# Altium footprint library Seeed_Studio_XIAO_Series_Footprints.PcbLib: 34 footprints (part 2 of 3)
Each footprint in its own frame and in the unit in brackets; x right, y up, seen from the top. Pads: shape width x height; smd on the part's side, far side on the other; paste and mask are expansions set on the pad; w line width, h text height; cw(c..) or ccw(c..) is an arc to the next point about the centre after c.
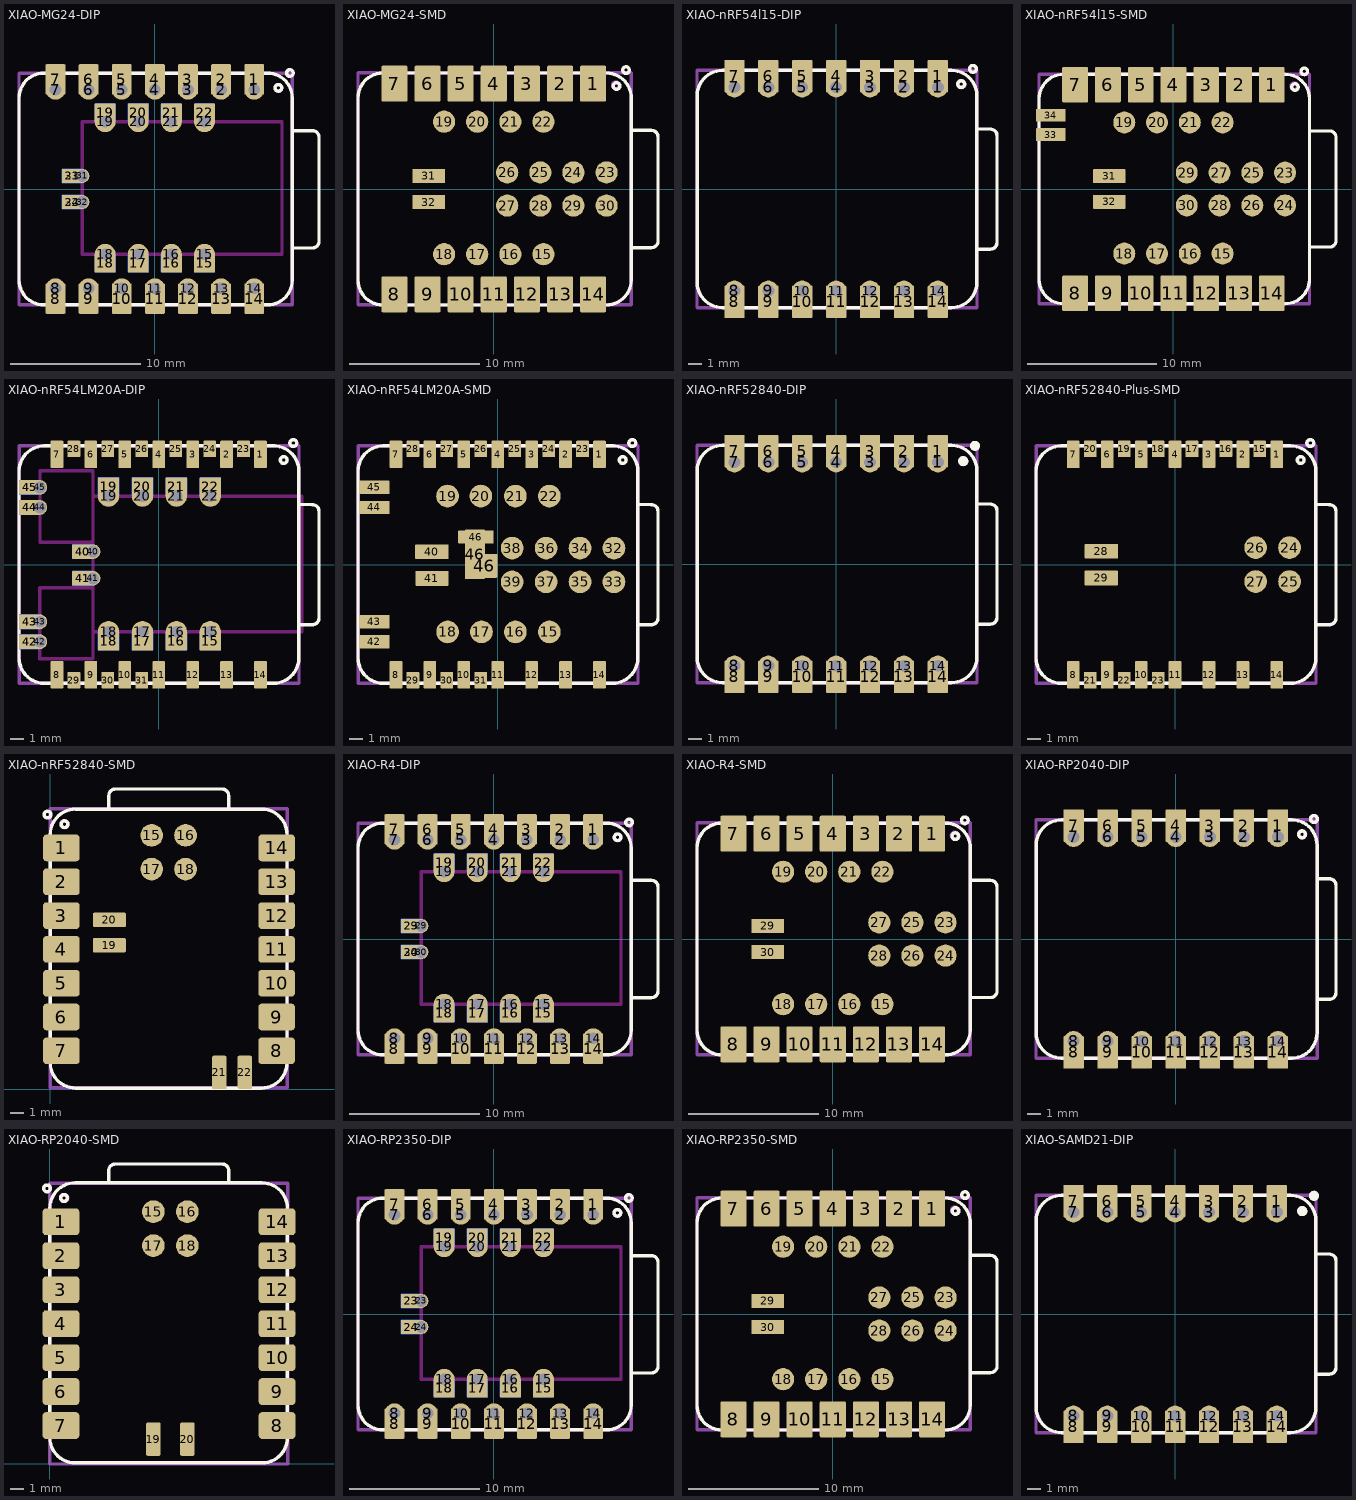
[diagram p1: the footprints below, top view; thin cyan lines are the x and y axes]

## XIAO-MG24-DIP [mm]
pads (58):
  round 1.524 hole 0.889: 1(7.62,7.62) 2(5.08,7.62) 3(2.54,7.62) 4(0,7.62) 5(-2.54,7.62) 6(-5.08,7.62) 7(-7.62,7.62) 8(-7.62,-7.62) 9(-5.08,-7.62) 10(-2.54,-7.62) 11(0,-7.62) 12(2.54,-7.62) 13(5.08,-7.62) 14(7.62,-7.62)
  rrect10% 1.524x2.332 smd: 1(7.62,8.405) 2(5.08,8.405) 3(2.54,8.405) 4(0,8.405) 5(-2.54,8.405) 6(-5.08,8.405) 7(-7.62,8.405) 8(-7.62,-8.405) 9(-5.08,-8.405) 10(-2.54,-8.405) 11(0,-8.405) 12(2.54,-8.405) 13(5.08,-8.405) 14(7.62,-8.405)
  rrect10% 1.6x1.4 smd: 15(3.81,-5.7) 16(1.27,-5.7) 17(-1.27,-5.7) 18(-3.81,-5.7) 19(-3.81,5.859) 20(-1.27,5.859) 21(1.27,5.859) 22(3.81,5.859)
  rrect10% 1.6x1.4 smd far side: 15(3.81,-5.7) 16(1.27,-5.7) 17(-1.27,-5.7) 18(-3.81,-5.7) 19(-3.81,5.859) 20(-1.27,5.859) 21(1.27,5.859) 22(3.81,5.859)
  round 1.6 hole 0.889: 15(3.81,-5.001) 16(1.27,-5.001) 17(-1.27,-5.001) 18(-3.81,-5.001) 19(-3.81,5.159) 20(-1.27,5.159) 21(1.27,5.159) 22(3.81,5.159)
  rrect10% 1.6x1.1 smd far side: 23(-6.33,1) 24(-6.33,-1)
  rrect10% 1.6x1.1 smd: 31(-6.33,1) 32(-6.33,-1)
  round 1.1 hole 0.889: 31(-5.575,1) 32(-5.575,-1)
F.SilkS:
  circle w0.254: c9.474,7.757 r0.254
  circle w0.254: c10.354,8.9 r0.254
  lines w0.254: 10.538,-7.008 10.538,6.962 ; 10.547,-4.522 12.091,-4.521 ccw(c12.091,-4.021) 12.591,-4.021 12.591,3.974 ccw(c12.091,3.974) 12.091,4.474 10.55,4.475 ; -10.414,-6.985 -10.414,6.985 cw(c-8.509,6.985) -8.509,8.89 8.636,8.89 cw(c8.636,6.985) 10.541,6.985 10.541,-6.985 cw(c8.636,-6.985) 8.636,-8.89 -8.509,-8.89 cw(c-8.509,-6.985) -10.414,-6.985
B.SilkS:
  lines w0.254: -8.128,-1.016 -7.366,-1.016 ; -8.128,1.016 -7.366,1.016 ; -7.747,0.635 -7.747,1.397
Edge.Cuts:
  lines w0.254: -5.575,-5.001 9.75,-5.001 ; -5.575,-5 -5.575,5.159 9.75,5.159 9.75,-5
F.CrtYd:
  lines w0.254: -10.42,-8.87 -10.42,8.88 10.54,8.88 10.54,-8.87 -10.42,-8.87
F.Fab:
  circle w0.254: c9.48,7.754 r0.254
  lines w0.254: -10.42,-8.89 -10.42,8.88 10.54,8.88 10.54,-8.89 -10.42,-8.89

## XIAO-MG24-SMD [mm]
pads (32):
  rrect10% 2x2.75 smd: 1(7.62,8.083) 2(5.08,8.083) 3(2.54,8.083) 4(0,8.083) 5(-2.54,8.083) 6(-5.08,8.083) 7(-7.62,8.083) 8(-7.62,-8.083) 9(-5.08,-8.083) 10(-2.54,-8.083) 11(0,-8.083) 12(2.54,-8.083) 13(5.08,-8.083) 14(7.62,-8.083)
  round 1.7 smd: 15(3.81,-5.001) 16(1.27,-5.001) 17(-1.27,-5.001) 18(-3.81,-5.001) 19(-3.81,5.159) 20(-1.27,5.159) 21(1.27,5.159) 22(3.81,5.159) 23(8.65,1.27) 24(6.11,1.27) 25(3.57,1.27) 26(1.03,1.27) 27(1.03,-1.27) 28(3.57,-1.27) 29(6.11,-1.27) 30(8.65,-1.27)
  rrect10% 2.5x1.1 smd: 31(-4.975,1) 32(-4.975,-1)
F.SilkS:
  circle w0.254: c9.414,7.899 r0.254
  circle w0.254: c10.137,9.116 r0.254
  lines w0.254: 8.636,8.89 -8.509,8.89 ccw(c-8.509,6.985) -10.414,6.985 -10.414,-6.985 ccw(c-8.509,-6.985) -8.509,-8.89 8.636,-8.89 ccw(c8.636,-6.985) 10.541,-6.985 10.541,6.985 ; 8.64,8.89 cw(c8.64,6.985) 10.545,6.985 ; 10.55,-4.499 12.094,-4.498 ccw(c12.094,-3.998) 12.594,-3.998 12.594,3.997 ccw(c12.094,3.997) 12.094,4.497 10.553,4.498
F.CrtYd:
  lines w0.254: -10.41,-8.87 -10.41,8.91 10.54,8.91 10.54,-8.87 -10.41,-8.87
F.Fab:
  circle w0.254: c9.357,7.961 r0.254
  lines w0.254: -10.41,-8.89 -10.41,8.9 10.54,8.9 10.54,-8.89 -10.41,-8.89

## XIAO-nRF54l15-DIP [mil]
pads (28):
  round 60 hole 35: 1(300,300) 2(200,300) 3(100,300) 4(0,300) 5(-100,300) 6(-200,300) 7(-300,300) 8(-300,-300) 9(-200,-300) 10(-100,-300) 11(0,-300) 12(100,-300) 13(200,-300) 14(300,-300)
  rrect10% 60x95.75 smd: 1(300,332.87) 2(200,332.87) 3(100,332.87) 4(0,332.87) 5(-100,332.87) 6(-200,332.87) 7(-300,332.87) 8(-300,-332.87) 9(-200,-332.87) 10(-100,-332.87) 11(0,-332.87) 12(100,-332.87) 13(200,-332.87) 14(300,-332.87)
F.SilkS:
  circle w10: c368.9,309.33 r10
  circle w10: c403.54,354.33 r10
  lines w10: 415,-177.32 454.76,-177.32 ccw(c454.76,-157.64) 474.45,-157.64 474.45,157.14 ccw(c454.76,157.14) 454.77,176.82 415,176.97 ; 415,-275 415,275 ; 415,-275 415,275 ; 415,-275 cw(c340,-275) 340,-350 -335,-350 cw(c-335,-275) -410,-275 -410,275 cw(c-335,275) -335,350 340,350 cw(c340,275) 415,275
F.CrtYd:
  lines w10: -410.43,-350.39 -410.43,350.39 415.35,350.39 415.35,-350.39 -410.43,-350.39
F.Fab:
  circle w10: c369.13,309.21 r10
  lines w10: -410.43,-350.39 -410.43,350.39 415.35,350.39 415.35,-350.39 -410.43,-350.39

## XIAO-nRF54l15-SMD [mm]
pads (34):
  rrect10% 2x2.75 smd: 1(7.62,8.083) 2(5.08,8.083) 3(2.54,8.083) 4(0,8.083) 5(-2.54,8.083) 6(-5.08,8.083) 7(-7.62,8.083) 8(-7.62,-8.083) 9(-5.08,-8.083) 10(-2.54,-8.083) 11(0,-8.083) 12(2.54,-8.083) 13(5.08,-8.083) 14(7.62,-8.083)
  round 1.7 smd: 15(3.81,-5.001) 16(1.27,-5.001) 17(-1.27,-5.001) 18(-3.81,-5.001) 19(-3.81,5.159) 20(-1.27,5.159) 21(1.27,5.159) 22(3.81,5.159) 23(8.65,1.27) 24(8.65,-1.27) 25(6.11,1.27) 26(6.11,-1.27) 27(3.57,1.27) 28(3.57,-1.27) 29(1.03,1.27) 30(1.03,-1.27)
  rrect10% 2.5x1.1 smd: 31(-4.975,1) 32(-4.975,-1)
  rrect10% 2.3x1 smd: 33(-9.5,4.211) 34(-9.5,5.711)
F.SilkS:
  circle w0.254: c9.414,7.899 r0.254
  circle w0.254: c10.137,9.116 r0.254
  lines w0.254: 8.636,8.89 -8.509,8.89 ccw(c-8.509,6.985) -10.414,6.985 -10.414,-6.985 ccw(c-8.509,-6.985) -8.509,-8.89 8.636,-8.89 ccw(c8.636,-6.985) 10.541,-6.985 10.541,6.985 ; 8.64,8.89 cw(c8.64,6.985) 10.545,6.985 ; 10.55,-4.499 12.094,-4.498 ccw(c12.094,-3.998) 12.594,-3.998 12.594,3.997 ccw(c12.094,3.997) 12.094,4.497 10.553,4.498
F.CrtYd:
  lines w0.254: -10.41,-8.87 -10.41,8.91 10.54,8.91 10.54,-8.87 -10.41,-8.87
F.Fab:
  circle w0.254: c9.357,7.961 r0.254
  lines w0.254: -10.41,-8.89 -10.41,8.9 10.54,8.9 10.54,-8.89 -10.41,-8.89

## XIAO-nRF54LM20A-DIP [mm]
pads (65):
  rrect10% 0.95x2.032 smd: 1(7.62,8.255) 2(5.08,8.255) 3(2.54,8.255) 4(0,8.255) 5(-2.54,8.255) 6(-5.08,8.255) 7(-7.62,8.255) 8(-7.62,-8.255) 9(-5.08,-8.255) 10(-2.54,-8.255) 11(0,-8.255) 12(2.54,-8.255) 13(5.08,-8.255) 14(7.62,-8.255)
  rrect10% 1.6x1.4 smd: 15(3.86,-5.732) 16(1.32,-5.732) 17(-1.22,-5.732) 18(-3.76,-5.732) 19(-3.76,5.827) 20(-1.22,5.827) 21(1.32,5.827) 22(3.86,5.827)
  rrect10% 1.6x1.4 smd far side: 15(3.86,-5.732) 16(1.32,-5.732) 17(-1.22,-5.732) 18(-3.76,-5.732) 19(-3.76,5.827) 20(-1.22,5.827) 21(1.32,5.827) 22(3.86,5.827)
  round 1.6 hole 0.889: 15(3.86,-5.033) 16(1.32,-5.033) 17(-1.22,-5.033) 18(-3.76,-5.033) 19(-3.76,5.127) 20(-1.22,5.127) 21(1.32,5.127) 22(3.86,5.127)
  rrect10% 0.95x1.232 smd: 23(6.35,8.655) 24(3.81,8.655) 25(1.27,8.655) 26(-1.27,8.655) 27(-3.81,8.655) 28(-6.35,8.655) 29(-6.35,-8.655) 30(-3.81,-8.655) 31(-1.27,-8.655)
  rrect10% 1.6x1.1 smd: 40(-5.68,0.968) 41(-5.68,-1.032) 42(-9.655,-5.776) 43(-9.655,-4.281) 44(-9.655,4.276) 45(-9.655,5.778)
  rrect10% 1.6x1.1 smd far side: 40(-5.68,0.968) 41(-5.68,-1.032) 42(-9.655,-5.776) 43(-9.655,-4.281) 44(-9.655,4.276) 45(-9.655,5.778)
  round 1.1 hole 0.889: 40(-4.925,0.968) 41(-4.925,-1.032) 42(-8.9,-5.776) 43(-8.9,-4.281) 44(-8.9,4.276) 45(-8.9,5.778)
F.SilkS:
  circle w0.254: c9.358,7.826 r0.254
  circle w0.254: c10.075,9.1 r0.254
  lines w0.254: -8.559,-8.89 cw(c-8.559,-6.985) -10.464,-6.985 -10.464,6.985 cw(c-8.559,6.985) -8.559,8.89 ; -8.509,-8.89 8.636,-8.89 ; -8.509,8.89 8.636,8.89 ; 8.586,-8.89 ccw(c8.586,-6.985) 10.491,-6.985 10.491,6.985 ; 8.59,8.89 cw(c8.59,6.985) 10.495,6.985 ; 10.491,-4.504 11.501,-4.504 ccw(c11.501,-4.004) 12.001,-4.004 12.001,3.991 ccw(c11.501,3.991) 11.501,4.491 10.491,4.495
B.SilkS:
  lines w0.254: -7.478,-1.048 -6.716,-1.048 ; -7.478,0.984 -6.716,0.984 ; -7.097,0.603 -7.097,1.365
Edge.Cuts:
  lines w0.254: -8.906,-7.039 -8.906,-1.725 -4.925,-1.725 -4.925,-7.039 -8.906,-7.039 ; -8.89,1.675 -8.89,7.01 -4.925,7.01 -4.925,1.675 -8.89,1.675 ; -4.925,-5.032 -4.925,5.127 10.7,5.127 10.7,-5.032 -4.925,-5.032
F.CrtYd:
  lines w0.254: -10.45,-8.9 -10.45,8.9 10.5,8.9 10.5,-8.9 -10.45,-8.9
F.Fab:
  lines w0.254: -10.45,-8.9 -10.45,8.9 10.5,8.9 10.5,-8.9 -10.45,-8.9

## XIAO-nRF54LM20A-SMD [mm]
pads (48):
  rrect10% 0.95x2.032 smd: 1(7.62,8.255) 2(5.08,8.255) 3(2.54,8.255) 4(0,8.255) 5(-2.54,8.255) 6(-5.08,8.255) 7(-7.62,8.255) 8(-7.62,-8.255) 9(-5.08,-8.255) 10(-2.54,-8.255) 11(0,-8.255) 12(2.54,-8.255) 13(5.08,-8.255) 14(7.62,-8.255)
  round 1.7 smd: 15(3.862,-5.044) 16(1.322,-5.044) 17(-1.217,-5.04) 18(-3.754,-5.046) 19(-3.76,5.127) 20(-1.266,5.128) 21(1.322,5.126) 22(3.862,5.126) 32(8.703,1.232) 33(8.703,-1.295) 34(6.163,1.232) 35(6.163,-1.295) 36(3.623,1.232) 37(3.623,-1.295) 38(1.083,1.232) 39(1.077,-1.295)
  rrect10% 0.95x1.232 smd: 23(6.35,8.655) 24(3.81,8.655) 25(1.27,8.655) 26(-1.27,8.655) 27(-3.81,8.655) 28(-6.35,8.655) 29(-6.35,-8.655) 30(-3.81,-8.655) 31(-1.27,-8.655)
  rrect10% 2.5x1.1 smd: 40(-4.928,0.961) 41(-4.923,-1.039)
  rrect10% 2.3x1 smd: 42(-9.248,-5.776) 43(-9.248,-4.281) 44(-9.248,4.276) 45(-9.248,5.778)
  rrect10% 1.5x3.7 smd: 46(-1.706,0.764)
  rrect10% 2.65x1 smd: 46(-1.632,2.063)
  rrect10% 2x1.8 smd: 46(-1.023,-0.091)
F.SilkS:
  circle w0.254: c9.358,7.826 r0.254
  circle w0.254: c10.075,9.1 r0.254
  lines w0.254: -8.559,-8.89 cw(c-8.559,-6.985) -10.464,-6.985 -10.464,6.985 cw(c-8.559,6.985) -8.559,8.89 ; -8.509,-8.89 8.636,-8.89 ; -8.509,8.89 8.636,8.89 ; 8.586,-8.89 ccw(c8.586,-6.985) 10.491,-6.985 10.491,6.985 ; 8.59,8.89 cw(c8.59,6.985) 10.495,6.985 ; 10.491,-4.504 11.501,-4.504 ccw(c11.501,-4.004) 12.001,-4.004 12.001,3.991 ccw(c11.501,3.991) 11.501,4.491 10.491,4.495
F.CrtYd:
  lines w0.254: -10.45,-8.9 -10.45,8.9 10.5,8.9 10.5,-8.9 -10.45,-8.9
F.Fab:
  lines w0.254: -10.45,-8.9 -10.45,8.9 10.5,8.9 10.5,-8.9 -10.45,-8.9

## XIAO-nRF52840-DIP [mil]
pads (28):
  round 60 hole 35: 1(300,300) 2(200,300) 3(100,300) 4(0,300) 5(-100,300) 6(-200,300) 7(-300,300) 8(-300,-300) 9(-200,-300) 10(-100,-300) 11(0,-300) 12(100,-300) 13(200,-300) 14(300,-300)
  rrect10% 60x95.75 smd: 1(300,332.87) 2(200,332.87) 3(100,332.87) 4(0,332.87) 5(-100,332.87) 6(-200,332.87) 7(-300,332.87) 8(-300,-332.87) 9(-200,-332.87) 10(-100,-332.87) 11(0,-332.87) 12(100,-332.87) 13(200,-332.87) 14(300,-332.87)
F.SilkS:
  circle w10: c374.8,303.43 r10
  region: 378.7,312.85 382.01,310.63 384.22,307.33 385,303.43 384.22,299.52 382.01,296.22 378.7,294.01 374.8,293.23 370.9,294.01 367.59,296.22 365.38,299.52 364.61,303.43 365.38,307.33 367.59,310.63 370.9,312.85 374.8,313.62
  circle w10: c409.45,348.43 r10
  region: 413.35,357.85 416.66,355.63 418.87,352.33 419.64,348.43 418.87,344.52 416.66,341.22 413.35,339.01 409.45,338.23 405.55,339.01 402.24,341.22 400.03,344.52 399.25,348.43 400.03,352.33 402.24,355.63 405.55,357.85 409.45,358.62
  lines w10: 415,-177.32 454.76,-177.32 ccw(c454.76,-157.63) 474.45,-157.64 474.45,157.14 ccw(c454.76,157.14) 454.77,176.82 415,176.97 ; 415,-275 415,275 ; 415,-275 415,275 ; 415,-275 cw(c340,-275) 340,-350 -335,-350 cw(c-335,-275) -410,-275 -410,275 cw(c-335,275) -335,350 340,350 cw(c340,275) 415,275
F.CrtYd:
  lines w10: -410.43,-350.39 -410.43,350.39 415.35,350.39 415.35,-350.39 -410.43,-350.39
F.Fab:
  circle w10: c375.04,303.31 r10
  region: 378.94,312.73 382.25,310.52 384.46,307.21 385.24,303.31 384.46,299.41 382.25,296.1 378.94,293.89 375.04,293.11 371.14,293.89 367.83,296.1 365.62,299.41 364.84,303.31 365.62,307.21 367.83,310.52 371.14,312.73 375.04,313.5
  lines w10: -410.43,-350.39 -410.43,350.39 415.35,350.39 415.35,-350.39 -410.43,-350.39

## XIAO-nRF52840-Plus-SMD [mm]
pads (29):
  rrect10% 0.95x2.032 smd: 1(7.62,8.255) 2(5.08,8.255) 3(2.54,8.255) 4(0,8.255) 5(-2.54,8.255) 6(-5.08,8.255) 7(-7.62,8.255) 8(-7.62,-8.255) 9(-5.08,-8.255) 10(-2.54,-8.255) 11(0,-8.255) 12(2.54,-8.255) 13(5.08,-8.255) 14(7.62,-8.255)
  rrect10% 0.95x1.232 smd: 15(6.35,8.655) 16(3.81,8.655) 17(1.27,8.655) 18(-1.27,8.655) 19(-3.81,8.655) 20(-6.35,8.655) 21(-6.35,-8.655) 22(-3.81,-8.655) 23(-1.27,-8.655)
  round 1.7 smd: 24(8.572,1.27) 25(8.572,-1.27) 26(6.032,1.27) 27(6.032,-1.27)
  rrect10% 2.5x1.1 smd: 28(-5.518,0.994) 29(-5.518,-1.006)
F.SilkS:
  circle w0.254: c9.408,7.826 r0.254
  circle w0.254: c10.125,9.1 r0.254
  lines w0.254: 8.636,8.89 -8.509,8.89 ccw(c-8.509,6.985) -10.414,6.985 -10.414,-6.985 ccw(c-8.509,-6.985) -8.509,-8.89 8.636,-8.89 ccw(c8.636,-6.985) 10.541,-6.985 10.541,6.985 ; 8.64,8.89 cw(c8.64,6.985) 10.545,6.985 ; 10.541,-4.504 11.551,-4.504 ccw(c11.551,-4.004) 12.051,-4.004 12.051,3.991 ccw(c11.551,3.991) 11.551,4.491 10.541,4.495
F.CrtYd:
  lines w0.254: -10.4,-8.9 -10.4,8.9 10.55,8.9 10.55,-8.9 -10.4,-8.9
F.Fab:
  lines w0.254: -10.4,-8.9 -10.4,8.9 10.55,8.9 10.55,-8.9 -10.4,-8.9

## XIAO-nRF52840-SMD [mm]
pads (22):
  rrect25% 2.75x2 smd: 1(0.835,18.12) 2(0.835,15.58) 3(0.835,13.04) 4(0.835,10.5) 5(0.835,7.96) 6(0.835,5.42) 7(0.835,2.88) 8(17,2.88) 9(17,5.42) 10(17,7.96) 11(17,10.5) 12(17,13.04) 13(17,15.58) 14(17,18.12)
  round 1.7 smd: 15(7.62,19.068) 16(10.16,19.068) 17(7.62,16.528) 18(10.16,16.528)
  rrect25% 2.5x1.1 smd: 19(4.445,10.813) 20(4.445,12.718)
  rrect25% 1.1x2.5 smd: 21(12.7,1.263) 22(14.605,1.263)
F.SilkS:
  circle w0.254: c-0.21,20.621 r0.254
  circle w0.254: c1.064,19.904 r0.254
  lines w0.254: 0,19.132 0,1.987 ccw(c1.905,1.987) 1.905,0.082 15.875,0.082 ccw(c15.875,1.987) 17.78,1.987 17.78,19.132 ccw(c15.875,19.132) 15.875,21.037 1.905,21.037 ; 0,19.136 cw(c1.905,19.136) 1.905,21.041 ; 4.395,21.037 4.399,22.047 cw(c4.899,22.047) 4.899,22.547 12.894,22.547 cw(c12.894,22.047) 13.394,22.047 13.394,21.037
F.CrtYd:
  lines w0.254: 0,0.1 0,21.05 17.8,21.05 17.8,0.1 0,0.1
F.Fab:
  circle w0.254: c1.084,19.9 r0.254
  lines w0.254: 0,0.1 0,21.05 17.8,21.05 17.8,0.1 0,0.1

## XIAO-R4-DIP [mm]
pads (58):
  round 1.524 hole 0.889: 1(7.62,7.62) 2(5.08,7.62) 3(2.54,7.62) 4(0,7.62) 5(-2.54,7.62) 6(-5.08,7.62) 7(-7.62,7.62) 8(-7.62,-7.62) 9(-5.08,-7.62) 10(-2.54,-7.62) 11(0,-7.62) 12(2.54,-7.62) 13(5.08,-7.62) 14(7.62,-7.62)
  rrect10% 1.524x2.332 smd: 1(7.62,8.405) 2(5.08,8.405) 3(2.54,8.405) 4(0,8.405) 5(-2.54,8.405) 6(-5.08,8.405) 7(-7.62,8.405) 8(-7.62,-8.405) 9(-5.08,-8.405) 10(-2.54,-8.405) 11(0,-8.405) 12(2.54,-8.405) 13(5.08,-8.405) 14(7.62,-8.405)
  rrect10% 1.6x1.4 smd: 15(3.81,-5.7) 16(1.27,-5.7) 17(-1.27,-5.7) 18(-3.81,-5.7) 19(-3.81,5.859) 20(-1.27,5.859) 21(1.27,5.859) 22(3.81,5.859)
  rrect10% 1.6x1.4 smd far side: 15(3.81,-5.7) 16(1.27,-5.7) 17(-1.27,-5.7) 18(-3.81,-5.7) 19(-3.81,5.859) 20(-1.27,5.859) 21(1.27,5.859) 22(3.81,5.859)
  round 1.6 hole 0.889: 15(3.81,-5.001) 16(1.27,-5.001) 17(-1.27,-5.001) 18(-3.81,-5.001) 19(-3.81,5.159) 20(-1.27,5.159) 21(1.27,5.159) 22(3.81,5.159)
  rrect10% 1.6x1.1 smd far side: 23(-6.33,1) 24(-6.33,-1)
  rrect10% 1.6x1.1 smd: 29(-6.33,1) 30(-6.33,-1)
  round 1.1 hole 0.889: 29(-5.575,1) 30(-5.575,-1)
F.SilkS:
  circle w0.254: c9.49,7.803 r0.254
  circle w0.254: c10.37,8.946 r0.254
  lines w0.254: 10.55,-4.499 12.094,-4.498 ccw(c12.094,-3.998) 12.594,-3.998 12.594,3.997 ccw(c12.094,3.997) 12.094,4.497 10.553,4.498 ; 10.541,-6.985 10.541,6.985 ; 10.541,-6.985 10.541,6.985 ; 10.541,-6.985 cw(c8.636,-6.985) 8.636,-8.89 -8.509,-8.89 cw(c-8.509,-6.985) -10.414,-6.985 -10.414,6.985 cw(c-8.509,6.985) -8.509,8.89 8.636,8.89 cw(c8.636,6.985) 10.541,6.985
B.SilkS:
  lines w0.254: -8.255,-1.016 -7.493,-1.016 ; -8.255,1.016 -7.493,1.016 ; -7.874,0.635 -7.874,1.397
Edge.Cuts:
  lines w0.254: -5.575,-5.001 9.75,-5.001 ; -5.575,-5 -5.575,5.159 9.75,5.159 9.75,-5
F.CrtYd:
  lines w0.254: -10.42,-8.87 -10.42,8.88 10.54,8.88 10.54,-8.87 -10.42,-8.87
F.Fab:
  circle w0.254: c9.496,7.8 r0.254
  lines w0.254: -10.42,-8.89 -10.42,8.88 10.54,8.88 10.54,-8.89 -10.42,-8.89

## XIAO-R4-SMD [mm]
pads (30):
  rrect10% 2x2.75 smd: 1(7.62,8.083) 2(5.08,8.083) 3(2.54,8.083) 4(0,8.083) 5(-2.54,8.083) 6(-5.08,8.083) 7(-7.62,8.083) 8(-7.62,-8.083) 9(-5.08,-8.083) 10(-2.54,-8.083) 11(0,-8.083) 12(2.54,-8.083) 13(5.08,-8.083) 14(7.62,-8.083)
  round 1.7 smd: 15(3.81,-5.001) 16(1.27,-5.001) 17(-1.27,-5.001) 18(-3.81,-5.001) 19(-3.81,5.159) 20(-1.27,5.159) 21(1.27,5.159) 22(3.81,5.159) 23(8.65,1.27) 24(8.65,-1.27) 25(6.11,1.27) 26(6.11,-1.27) 27(3.57,1.27) 28(3.57,-1.27)
  rrect10% 2.5x1.1 smd: 29(-4.975,1) 30(-4.975,-1)
F.SilkS:
  circle w0.254: c9.407,7.888 r0.254
  circle w0.254: c10.125,9.1 r0.254
  circle w0.254: c10.13,9.105 r0.254
  lines w0.254: 8.636,8.89 -8.509,8.89 ccw(c-8.509,6.985) -10.414,6.985 -10.414,-6.985 ccw(c-8.509,-6.985) -8.509,-8.89 8.636,-8.89 ccw(c8.636,-6.985) 10.541,-6.985 10.541,6.985 ; 8.64,8.89 cw(c8.64,6.985) 10.545,6.985 ; 8.641,8.895 -8.504,8.895 ccw(c-8.504,6.99) -10.409,6.99 -10.409,-6.98 ccw(c-8.504,-6.98) -8.504,-8.885 8.641,-8.885 ccw(c8.641,-6.98) 10.546,-6.98 ; 8.645,8.895 cw(c8.645,6.99) 10.55,6.99 ; 10.555,-4.494 12.099,-4.493 ccw(c12.099,-3.993) 12.599,-3.993 12.599,4.002 ccw(c12.099,4.002) 12.099,4.502 10.558,4.503 ; 10.546,-6.98 10.546,6.99 ; 10.546,-6.98 10.546,6.99 ; 10.546,-6.98 10.546,6.99
F.CrtYd:
  lines w0.254: -10.41,-8.87 -10.41,8.91 10.54,8.91 10.54,-8.87 -10.41,-8.87
F.Fab:
  circle w0.254: c9.35,7.95 r0.254
  lines w0.254: -10.41,-8.89 -10.41,8.9 10.54,8.9 10.54,-8.89 -10.41,-8.89

## XIAO-RP2040-DIP [mil]
pads (28):
  round 60 hole 35: 1(300,300) 2(200,300) 3(100,300) 4(0,300) 5(-100,300) 6(-200,300) 7(-300,300) 8(-300,-300) 9(-200,-300) 10(-100,-300) 11(0,-300) 12(100,-300) 13(200,-300) 14(300,-300)
  rrect10% 60x95.75 smd: 1(300,332.87) 2(200,332.87) 3(100,332.87) 4(0,332.87) 5(-100,332.87) 6(-200,332.87) 7(-300,332.87) 8(-300,-332.87) 9(-200,-332.87) 10(-100,-332.87) 11(0,-332.87) 12(100,-332.87) 13(200,-332.87) 14(300,-332.87)
F.SilkS:
  circle w10: c370.87,307.36 r10
  circle w10: c405.51,352.36 r10
  lines w10: 415,-177.32 450.83,-177.32 ccw(c450.83,-157.64) 470.51,-157.64 470.51,157.14 ccw(c450.83,157.14) 450.84,176.82 415,176.97 ; 415,-275 415,275 ; 415,-275 415,275 ; 415,-275 cw(c340,-275) 340,-350 -335,-350 cw(c-335,-275) -410,-275 -410,275 cw(c-335,275) -335,350 340,350 cw(c340,275) 415,275
F.CrtYd:
  lines w10: -410.43,-350.39 -410.43,350.39 415.35,350.39 415.35,-350.39 -410.43,-350.39
F.Fab:
  circle w10: c371.1,307.24 r10
  lines w10: -410.43,-350.39 -410.43,350.39 415.35,350.39 415.35,-350.39 -410.43,-350.39

## XIAO-RP2040-SMD [mm]
pads (20):
  rrect25% 2.75x2 smd: 1(0.835,18.12) 2(0.835,15.58) 3(0.835,13.04) 4(0.835,10.5) 5(0.835,7.96) 6(0.835,5.42) 7(0.835,2.88) 8(17,2.88) 9(17,5.42) 10(17,7.96) 11(17,10.5) 12(17,13.04) 13(17,15.58) 14(17,18.12)
  round 1.7 smd: 15(7.747,18.878) 16(10.287,18.878) 17(7.747,16.338) 18(10.287,16.338)
  rrect25% 1.1x2.5 smd: 19(7.747,1.86) 20(10.287,1.86)
F.SilkS:
  circle w0.254: c-0.21,20.621 r0.254
  circle w0.254: c1.064,19.904 r0.254
  lines w0.254: 0,19.132 0,1.987 ccw(c1.905,1.987) 1.905,0.082 15.875,0.082 ccw(c15.875,1.987) 17.78,1.987 17.78,19.132 ccw(c15.875,19.132) 15.875,21.037 1.905,21.037 ; 0,19.136 cw(c1.905,19.136) 1.905,21.041 ; 4.395,21.037 4.399,21.947 cw(c4.899,21.947) 4.899,22.447 12.894,22.447 cw(c12.894,21.947) 13.394,21.947 13.394,21.037
F.CrtYd:
  lines w0.254: 0,0 0,21 17.8,21 17.8,0 0,0
F.Fab:
  circle w0.254: c1.084,19.9 r0.254
  lines w0.254: 0,0 0,21 17.8,21 17.8,0 0,0

## XIAO-RP2350-DIP [mm]
pads (58):
  round 1.524 hole 0.889: 1(7.62,7.62) 2(5.08,7.62) 3(2.54,7.62) 4(0,7.62) 5(-2.54,7.62) 6(-5.08,7.62) 7(-7.62,7.62) 8(-7.62,-7.62) 9(-5.08,-7.62) 10(-2.54,-7.62) 11(0,-7.62) 12(2.54,-7.62) 13(5.08,-7.62) 14(7.62,-7.62)
  rrect10% 1.524x2.332 smd: 1(7.62,8.405) 2(5.08,8.405) 3(2.54,8.405) 4(0,8.405) 5(-2.54,8.405) 6(-5.08,8.405) 7(-7.62,8.405) 8(-7.62,-8.405) 9(-5.08,-8.405) 10(-2.54,-8.405) 11(0,-8.405) 12(2.54,-8.405) 13(5.08,-8.405) 14(7.62,-8.405)
  rrect10% 1.6x1.4 smd: 15(3.81,-5.7) 16(1.27,-5.7) 17(-1.27,-5.7) 18(-3.81,-5.7) 19(-3.81,5.859) 20(-1.27,5.859) 21(1.27,5.859) 22(3.81,5.859)
  rrect10% 1.6x1.4 smd far side: 15(3.81,-5.7) 16(1.27,-5.7) 17(-1.27,-5.7) 18(-3.81,-5.7) 19(-3.81,5.859) 20(-1.27,5.859) 21(1.27,5.859) 22(3.81,5.859)
  round 1.6 hole 0.889: 15(3.81,-5.001) 16(1.27,-5.001) 17(-1.27,-5.001) 18(-3.81,-5.001) 19(-3.81,5.159) 20(-1.27,5.159) 21(1.27,5.159) 22(3.81,5.159)
  rrect10% 1.6x1.1 smd: 23(-6.33,1) 24(-6.33,-1)
  rrect10% 1.6x1.1 smd far side: 23(-6.33,1) 24(-6.33,-1)
  round 1.1 hole 0.889: 23(-5.575,1) 24(-5.575,-1)
F.SilkS:
  circle w0.254: c9.474,7.757 r0.254
  circle w0.254: c10.354,8.9 r0.254
  lines w0.254: 10.538,-7.008 10.538,6.962 ; 10.547,-4.522 12.091,-4.521 ccw(c12.091,-4.021) 12.591,-4.021 12.591,3.974 ccw(c12.091,3.974) 12.091,4.474 10.55,4.475 ; -10.414,-6.985 -10.414,6.985 cw(c-8.509,6.985) -8.509,8.89 8.636,8.89 cw(c8.636,6.985) 10.541,6.985 10.541,-6.985 cw(c8.636,-6.985) 8.636,-8.89 -8.509,-8.89 cw(c-8.509,-6.985) -10.414,-6.985
B.SilkS:
  lines w0.254: -8.128,-1.016 -7.366,-1.016 ; -8.128,1.016 -7.366,1.016 ; -7.747,0.635 -7.747,1.397
Edge.Cuts:
  lines w0.254: -5.575,-5.001 9.75,-5.001 ; -5.575,-5 -5.575,5.159 9.75,5.159 9.75,-5
F.CrtYd:
  lines w0.254: -10.42,-8.87 -10.42,8.88 10.54,8.88 10.54,-8.87 -10.42,-8.87
F.Fab:
  circle w0.254: c9.48,7.754 r0.254
  lines w0.254: -10.42,-8.89 -10.42,8.88 10.54,8.88 10.54,-8.89 -10.42,-8.89

## XIAO-RP2350-SMD [mm]
pads (30):
  rrect10% 2x2.75 smd: 1(7.62,8.083) 2(5.08,8.083) 3(2.54,8.083) 4(0,8.083) 5(-2.54,8.083) 6(-5.08,8.083) 7(-7.62,8.083) 8(-7.62,-8.083) 9(-5.08,-8.083) 10(-2.54,-8.083) 11(0,-8.083) 12(2.54,-8.083) 13(5.08,-8.083) 14(7.62,-8.083)
  round 1.7 smd: 15(3.81,-5.001) 16(1.27,-5.001) 17(-1.27,-5.001) 18(-3.81,-5.001) 19(-3.81,5.159) 20(-1.27,5.159) 21(1.27,5.159) 22(3.81,5.159) 23(8.65,1.27) 24(8.65,-1.27) 25(6.11,1.27) 26(6.11,-1.27) 27(3.57,1.27) 28(3.57,-1.27)
  rrect10% 2.5x1.1 smd: 29(-4.975,1) 30(-4.975,-1)
F.SilkS:
  circle w0.254: c9.414,7.899 r0.254
  circle w0.254: c10.137,9.116 r0.254
  lines w0.254: 8.636,8.89 -8.509,8.89 ccw(c-8.509,6.985) -10.414,6.985 -10.414,-6.985 ccw(c-8.509,-6.985) -8.509,-8.89 8.636,-8.89 ccw(c8.636,-6.985) 10.541,-6.985 10.541,6.985 ; 8.64,8.89 cw(c8.64,6.985) 10.545,6.985 ; 10.55,-4.499 12.094,-4.498 ccw(c12.094,-3.998) 12.594,-3.998 12.594,3.997 ccw(c12.094,3.997) 12.094,4.497 10.553,4.498
F.CrtYd:
  lines w0.254: -10.41,-8.87 -10.41,8.91 10.54,8.91 10.54,-8.87 -10.41,-8.87
F.Fab:
  circle w0.254: c9.357,7.961 r0.254
  lines w0.254: -10.41,-8.89 -10.41,8.9 10.54,8.9 10.54,-8.89 -10.41,-8.89

## XIAO-SAMD21-DIP [mil]
pads (28):
  round 60 hole 35: 1(300,300) 2(200,300) 3(100,300) 4(0,300) 5(-100,300) 6(-200,300) 7(-300,300) 8(-300,-300) 9(-200,-300) 10(-100,-300) 11(0,-300) 12(100,-300) 13(200,-300) 14(300,-300)
  rrect10% 60x95.75 smd: 1(300,332.87) 2(200,332.87) 3(100,332.87) 4(0,332.87) 5(-100,332.87) 6(-200,332.87) 7(-300,332.87) 8(-300,-332.87) 9(-200,-332.87) 10(-100,-332.87) 11(0,-332.87) 12(100,-332.87) 13(200,-332.87) 14(300,-332.87)
F.SilkS:
  circle w10: c374.8,303.58 r10
  region: 378.7,313 382.01,310.79 384.22,307.48 385,303.58 384.22,299.68 382.01,296.37 378.7,294.16 374.8,293.39 370.9,294.16 367.59,296.37 365.38,299.68 364.61,303.58 365.38,307.48 367.59,310.79 370.9,313 374.8,313.78
  circle w10: c409.45,348.58 r10
  region: 413.35,358 416.66,355.79 418.87,352.48 419.64,348.58 418.87,344.68 416.66,341.37 413.35,339.16 409.45,338.39 405.55,339.16 402.24,341.37 400.03,344.68 399.25,348.58 400.03,352.48 402.24,355.79 405.55,358 409.45,358.78
  lines w10: 415,-177.32 454.76,-177.32 ccw(c454.76,-157.64) 474.45,-157.64 474.45,157.14 ccw(c454.76,157.14) 454.77,176.82 415,176.97 ; 415,-275 415,275 ; 415,-275 415,275 ; 415,-275 cw(c340,-275) 340,-350 -335,-350 cw(c-335,-275) -410,-275 -410,275 cw(c-335,275) -335,350 340,350 cw(c340,275) 415,275
F.CrtYd:
  lines w10: -410.43,-350.39 -410.43,350.39 415.35,350.39 415.35,-350.39 -410.43,-350.39
F.Fab:
  circle w10: c375.04,303.46 r10
  region: 378.94,312.88 382.25,310.67 384.46,307.37 385.24,303.46 384.46,299.56 382.25,296.25 378.94,294.04 375.04,293.27 371.14,294.04 367.83,296.25 365.62,299.56 364.84,303.46 365.62,307.37 367.83,310.67 371.14,312.88 375.04,313.66
  lines w10: -410.43,-350.39 -410.43,350.39 415.35,350.39 415.35,-350.39 -410.43,-350.39